# Altium integrated library G83270022.IntLib: 1 symbol
Pins are listed as number, name and electrical type; pins without a type are passive.

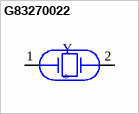
[diagram p0: symbol G83270022]

## G83270022
designator Y
32.768kHz Â±10ppm Crystal 12.5pF 70 kOhms 2-SMD, No Lead; MF: Diodes Inc.; MP: G83270022; Value: *; Package: CSP-2 Diodes Inc.; Price: None; Availability: Unavailable; SnapEDA_Link: https://www.snapeda.com/parts/G83270022/Diodes%20Inc./view-part/1262681/?ref=snap
footprint XTAL_G83270022
pins: 1, 2